# Altium footprint library Connectors.PcbLib: 69 footprints (part 1 of 5)
Each footprint in its own frame and in the unit in brackets; x right, y up, seen from the top. Pads: shape width x height; smd on the part's side, far side on the other; paste and mask are expansions set on the pad; w line width, h text height; cw(c..) or ccw(c..) is an arc to the next point about the centre after c.
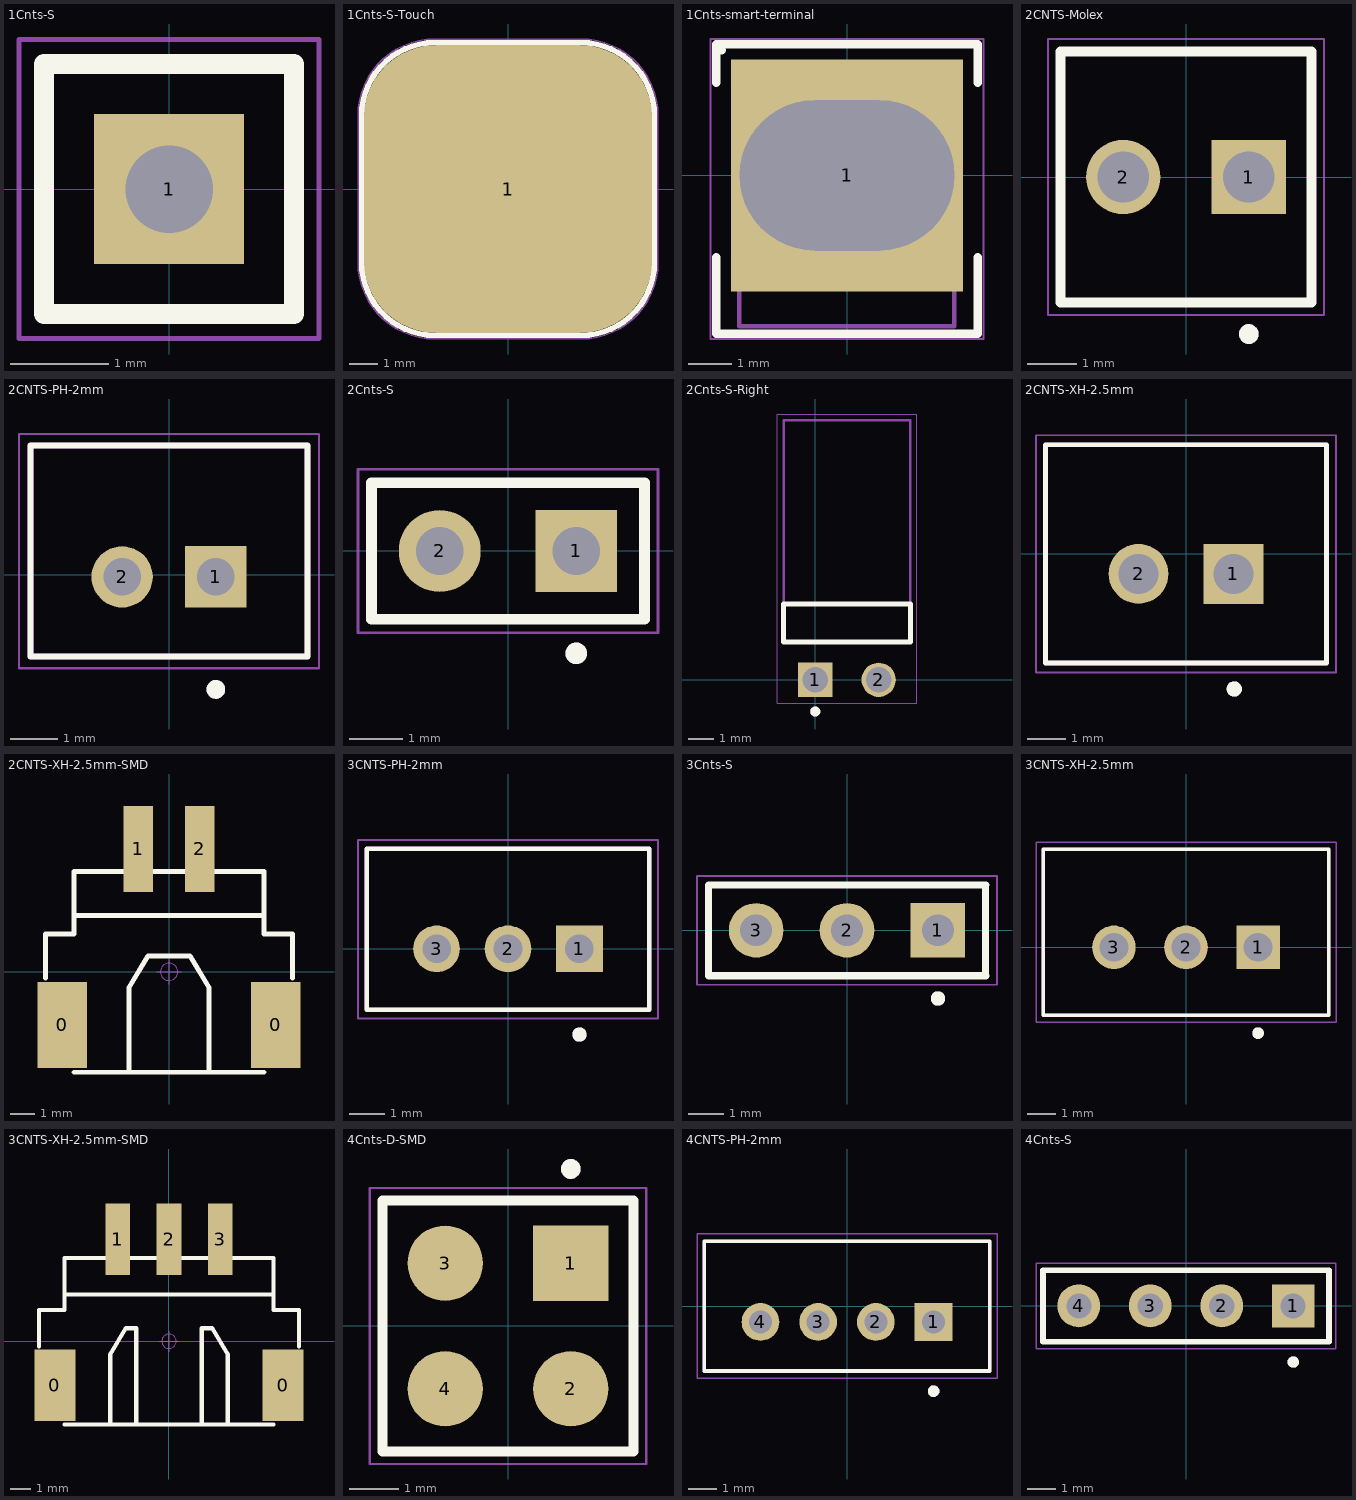
[diagram p0: the footprints below, top view; thin cyan lines are the x and y axes]

## 1Cnts-S [mil] "1Cnts-S"
pads (1):
  rect 60x60 hole 35: 1(0,0)
Top Overlay:
  lines w7.87: -50,-50 50,-50 50,50 -50,50 -50,-50
Mechanical 13:
  lines w3.94: -50,-50 50,-50 50,50 -50,50 -50,-50
Mechanical 15:
  lines w1.97: -60,-59.84 60,-59.84 60,59.84 -60,59.84 -60,-59.84
3D body "header1pin.stp": height 336.24, standoff -118.09, extent -50,-50 50,50

## 1Cnts-S-Touch [mm] "1Cnts-S-Touch-sensor"
pads (1):
  rrect50% 10x10 smd mask+0.102: 1(0,0)
Top Overlay:
  lines w0.2: -5.08,-2.54 ccw(c-2.54,-2.54) -2.54,-5.08 2.54,-5.08 ccw(c2.54,-2.54) 5.08,-2.54 5.08,2.54 ccw(c2.54,2.54) 2.54,5.08 -2.54,5.08 ccw(c-2.54,2.54) -5.08,2.54 -5.08,-2.54
Mechanical 13:
  lines w0.1: -5.08,-2.54 ccw(c-2.54,-2.54) -2.54,-5.08 2.54,-5.08 ccw(c2.54,-2.54) 5.08,-2.54 5.08,2.54 ccw(c2.54,2.54) 2.54,5.08 -2.54,5.08 ccw(c-2.54,2.54) -5.08,2.54 -5.08,-2.54
Mechanical 15:
  lines w0.05: -5.207,-2.54 ccw(c-2.54,-2.54) -2.54,-5.207 2.54,-5.207 ccw(c2.54,-2.54) 5.207,-2.54 5.207,2.54 ccw(c2.54,2.54) 2.54,5.207 -2.54,5.207 ccw(c-2.54,2.54) -5.207,2.54 -5.207,-2.54

## 1Cnts-smart-terminal [mm] "1Cnts-smart-terminal"
pads (1):
  rect 5.4x5.4 hole 3.5 slot 5 at 0 deg: 1(0,0)
Top Overlay:
  lines w0.2: -3.047,-1.905 -3.047,-3.683 3.048,-3.683 3.048,-1.905 ; -3.047,2.159 -3.047,3.048 3.048,3.048 3.048,2.159 ; -2.921,2.913 -2.921,2.913
Mechanical 13:
  lines w0.1: -2.509,-2.243 -2.509,-3.512 2.5,-3.512 2.5,-2.246 ; -2.509,2.286 -2.509,2.492 2.5,2.492 2.5,2.286
Mechanical 15:
  lines w0.05: -3.175,-3.81 -3.175,3.175 3.175,3.175 3.175,-3.81 -3.175,-3.81
3D body "smart-terminal.STEP": height 6.5, standoff -2, extent -2.504,-3.508 2.496,2.492

## 2CNTS-Molex [mm] "2CNTS-Molex"
pads (2):
  rect 1.5x1.5 hole 1.04: 1(1.27,0)
  round 1.5 hole 1.04: 2(-1.27,0)
Top Overlay:
  circle w0.2: c1.27,-3.175 r0.1
  lines w0.2: -2.54,-2.54 2.54,-2.54 2.54,2.54 -2.54,2.54 -2.54,-2.54
Mechanical 13:
  circle w0.2: c1.27,-3.175 r0.1
  lines w0.1: -2.54,2.54 2.54,2.54 ; -2.54,2.54 2.54,2.54 ; -2.54,2.54 -2.54,-2.54 2.54,-2.54 2.54,2.54
Mechanical 15:
  lines w0.05: -2.79,-2.79 -2.79,2.79 2.79,2.79 2.79,-2.79 -2.79,-2.79
3D body "LCW-102-07-T-S-230.stp": height 8.38, standoff -2.54, extent -2.54,-2.54 2.54,2.54

## 2CNTS-PH-2mm [mm] "JST_B2B-2CNTS-PH-2mm"
pads (2):
  rect 1.308x1.308 hole 0.8: 1(1,-0.042)
  round 1.308 hole 0.8: 2(-1,-0.042)
Top Overlay:
  circle w0.2: c1,-2.442 r0.1
  lines w0.127: -2.95,-1.742 2.95,-1.742 2.95,2.758 -2.95,2.758 -2.95,-1.742
Mechanical 13:
  circle w0.2: c1,-2.442 r0.1
  lines w0.127: -2.95,-1.742 -2.95,2.758 2.95,2.758 2.95,-1.742 -2.95,-1.742
Mechanical 15:
  lines w0.05: -3.2,-1.992 -3.2,3.008 3.2,3.008 3.2,-1.992 -3.2,-1.992
3D body "step_temp.STEP": height 6.03, standoff -3.37, extent -2.95,-1.742 2.95,2.758

## 2Cnts-S [mil] "2Cnts-S"
pads (2):
  rect 60x60 hole 35: 1(50,0)
  round 60 hole 35: 2(-50,0)
Top Overlay:
  circle w7.87: c50,-75 r3.94
  lines w7.87: -100,-50 100,-50 100,50 -100,50 -100,-50
Mechanical 13:
  circle w7.87: c50,-75 r3.94
  lines w3.94: -100,-50 100,-50 100,50 -100,50 -100,-50
Mechanical 15:
  lines w1.97: -109.84,-59.84 109.84,-59.84 109.84,59.84 -109.84,59.84 -109.84,-59.84
3D body "2Cnts-S.step": height 336.22, standoff -78.74, extent -100,-50 100,50

## 2Cnts-S-Right [mm] "2Cnts-S-Right"
pads (2):
  rect 1.37x1.37 hole 1.02: 1(0,0)
  round 1.37 hole 1.02: 2(2.54,0)
Top Overlay:
  circle w0.2: c0,-1.27 r0.1
  lines w0.2: -1.27,1.52 -1.27,3.04 3.81,3.04 3.81,1.52 -1.27,1.52
Mechanical 13:
  circle w0.2: c-0.015,-1.27 r0.1
  lines w0.1: -1.27,1.52 -1.27,3.04 3.81,3.04 3.81,1.52 ; -1.27,1.52 3.81,1.52 ; -1.27,1.52 -1.27,10.4 3.81,10.4 3.81,1.52
Mechanical 15:
  lines w0.05: -1.52,-0.935 -1.52,10.65 4.06,10.65 4.06,-0.935 -1.52,-0.935
3D body "TLW-102-01-G-S-RA.stp": height 2.54, standoff -2.99, extent -1.27,-0.318 3.81,8.89

## 2CNTS-XH-2.5mm [mm] "c"
height 7
pads (2):
  rect 1.575x1.575 hole 1.05: 1(1.25,-0.525)
  round 1.575 hole 1.05: 2(-1.25,-0.525)
Top Overlay:
  circle w0.2: c1.27,-3.556 r0.1
  lines w0.127: -3.7,-2.875 -3.7,2.875 3.7,2.875 3.7,-2.875 -3.7,-2.875
Mechanical 13:
  circle w0.2: c1.27,-3.556 r0.1
  lines w0.127: -3.7,-2.875 -3.7,2.875 3.7,2.875 3.7,-2.875 -3.7,-2.875
Mechanical 15:
  lines w0.05: -3.95,-3.125 3.95,-3.125 3.95,3.125 -3.95,3.125 -3.95,-3.125
3D body "B2B-XH-A--3DModel-STEP-56544.STEP": height 7.03, standoff -3.37, extent -3.7,-2.875 3.7,2.875

## 2CNTS-XH-2.5mm-SMD [mm] "2pin 2515connecor 2.54 mm pitch male smd"
pads (4):
  rect 2x3.5 smd: 0(-4.327,-2.15) 0(4.327,-2.15)
  rect 1.2x3.5 smd: 1(-1.25,4.981) 2(1.25,4.981)
Top Overlay:
  lines w0.2: -5,-0.254 -5,1.536 -3.85,1.536 -3.85,4.064 3.85,4.064 3.85,1.536 5,1.536 5,-0.254 ; -3.85,-4.064 3.85,-4.064 ; -3.85,2.286 3.85,2.286 ; -1.62,-4.064 -1.62,-0.634 -0.858,0.636 -0.35,0.636 0.858,0.636 1.62,-0.634 1.62,-4.064
Mechanical 15:
  circle w0.05: c0,0 r0.35
  lines w0.05: -0.5,0 0.5,0 ; 0,-0.5 0,0.5
3D body "XH2.54-WS-2P.STEP": height 6.05, standoff -0.01, extent -5,-4 5,6.418

## 3CNTS-PH-2mm [mm] "JST_B2B-3CNTS-PH-2mm"
pads (3):
  rect 1.308x1.308 hole 0.8: 1(2,0)
  round 1.308 hole 0.8: 2(0,0) 3(-2,0)
Top Overlay:
  circle w0.2: c2,-2.4 r0.1
  lines w0.127: -3.95,-1.7 -3.95,2.8 3.95,2.8 3.95,-1.7 -3.95,-1.7
Mechanical 13:
  circle w0.2: c2,-2.4 r0.1
  lines w0.127: -3.95,-1.7 3.95,-1.7 3.95,2.8 -3.95,2.8 -3.95,-1.7
Mechanical 15:
  lines w0.05: -4.2,-1.95 4.2,-1.95 4.2,3.05 -4.2,3.05 -4.2,-1.95
3D body "B3B-PH-K-S--3DModel-STEP-56544.STEP": height 6.03, standoff -3.37, extent -3.95,-1.7 3.95,2.8

## 3Cnts-S [mil] "3Cnts-S"
pads (3):
  rect 60x60 hole 35: 1(100,0)
  round 60 hole 35: 2(0,0) 3(-100,0)
Top Overlay:
  circle w7.87: c100,-75 r3.94
  lines w7.87: 152.44,-50 152.44,50 ; 152.55,-50 -152.44,-50 -152.44,50 152.55,50
Mechanical 13:
  circle w7.87: c100,-75 r3.94
  lines w3.94: -152.84,-50 152.24,-50 ; -152.84,50.11 -152.84,-49.89 -152.84,50.11 ; -152.84,50.11 152.14,49.9 -152.84,50.11 ; 152.24,-50.24 152.24,49.76 152.24,-50.24
Mechanical 15:
  lines w1.97: -165,-59.84 -165,59.84 165,59.84 165,-59.84 -165,-59.84
3D body "3Cnts-S.STEP": height 329.92, standoff -120.08, extent -150,-47.44 150,47.44

## 3CNTS-XH-2.5mm [mm] "JST_B2B-3CNTS-XH-2.5mm"
height 7
pads (3):
  rect 1.508x1.508 hole 1: 1(2.5,0)
  round 1.508 hole 1: 2(0,0) 3(-2.5,0)
Top Overlay:
  circle w0.2: c2.5,-2.975 r0.1
  lines w0.127: -4.95,-2.35 4.95,-2.35 4.95,3.4 -4.95,3.4 -4.95,-2.35
Mechanical 13:
  circle w0.2: c2.5,-2.975 r0.1
  lines w0.127: -4.95,-2.35 4.95,-2.35 4.95,3.4 -4.95,3.4 -4.95,-2.35
Mechanical 15:
  lines w0.05: -5.2,-2.6 5.2,-2.6 5.2,3.65 -5.2,3.65 -5.2,-2.6
3D body "step_temp.STEP": height 7.03, standoff -3.37, extent -4.95,-2.35 4.95,3.4

## 3CNTS-XH-2.5mm-SMD [mm] "3pin 2515connecor 2.54 mm pitch male smd"
pads (5):
  rect 2x3.5 smd: 0(-5.577,-2.15) 0(5.577,-2.15)
  rect 1.2x3.5 smd: 1(-2.5,4.981) 2(0,4.981) 3(2.5,4.981)
Top Overlay:
  lines w0.2: -6.35,-0.254 -6.35,1.536 -5.1,1.536 -5.1,4.064 5.1,4.064 5.1,1.536 6.35,1.536 6.35,-0.254 ; -5.1,-4.064 5.1,-4.064 ; -5.1,2.286 5.1,2.286 ; -2.87,-4.064 -2.87,-0.634 -2.108,0.636 -1.6,0.636 -1.6,-4.064 ; 1.6,-4.064 1.6,0.636 2.108,0.636 2.87,-0.634 2.87,-4.064
Mechanical 15:
  circle w0.05: c0,0 r0.35
  lines w0.05: -0.5,0 0.5,0 ; 0,-0.5 0,0.5
3D body "XH2.54-WS-3P.STEP": height 6.05, standoff -0.01, extent -6.25,-4 6.25,6.418

## 4Cnts-D-SMD [mil] "4Cnts-D-SMD"
pads (4):
  rect 60x60 smd: 1(50,50)
  round 60 smd: 2(50,-50) 3(-50,50) 4(-50,-50)
Top Overlay:
  circle w7.87: c50,125 r3.94
  lines w7.87: -100,-100 -100,100 100,100 100,-100 -100,-100
Mechanical 13:
  circle w7.87: c50,125 r3.94
  lines w3.94: -100,-100 100,-100 100,100 -100,100 -100,-100
Mechanical 15:
  lines w1.97: -110,-109.84 110,-109.84 110,109.84 -110,109.84 -110,-109.84

## 4CNTS-PH-2mm [mm] "JST_B2B-4CNTS-PH-2mm"
pads (4):
  rect 1.308x1.308 hole 0.8: 1(3,-0.55)
  round 1.308 hole 0.8: 2(1,-0.55) 3(-1,-0.55) 4(-3,-0.55)
Top Overlay:
  circle w0.2: c3,-2.95 r0.1
  lines w0.127: -4.95,-2.25 -4.95,2.25 4.95,2.25 4.95,-2.25 -4.95,-2.25
Mechanical 13:
  circle w0.2: c3,-2.95 r0.1
  lines w0.127: -4.95,-2.25 4.95,-2.25 4.95,2.25 -4.95,2.25 -4.95,-2.25
Mechanical 15:
  lines w0.05: -5.2,-2.5 5.2,-2.5 5.2,2.5 -5.2,2.5 -5.2,-2.5
3D body "B4B-PH-K-S--3DModel-STEP-56544.STEP": height 6.03, standoff -3.37, extent -4.95,-2.25 4.95,2.25

## 4Cnts-S [mil] "4Cnts-S"
pads (4):
  rect 60x60 hole 35: 1(150,0)
  round 60 hole 35: 2(50,0) 3(-50,0) 4(-150,0)
Top Overlay:
  circle w7.87: c150,-78.74 r3.94
  lines w7.87: -200,-50 -200,50 200,50 200,-50 -200,-50
Mechanical 13:
  circle w7.87: c150,-78.74 r3.94
  lines w3.94: -200,-50 -200,50 ; -200,-50 200,-50 ; -200,-50 -200,50 ; -200,50 200,50 ; -200,50 200,50 ; 200,-50 200,50 ; 200,-50 200,50
Mechanical 15:
  lines w1.97: -209.84,-59.84 -209.84,59.84 209.84,59.84 209.84,-59.84 -209.84,-59.84
3D body "4Cnts-S.step": height 336.22, standoff -78.74, extent -200,-50 200,50